# Altium integrated library UCC28C43QDR.IntLib: 1 symbol
Pins are listed as number, name and electrical type; pins without a type are passive.

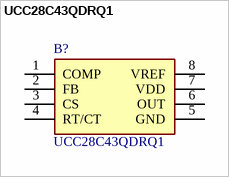
[diagram p0: symbol UCC28C43QDRQ1]

## UCC28C43QDRQ1
designator B?
Automotive BiCMOS Low-Power Current-Mode PWM Controller; Manufacturer_Name: Texas Instruments; Geometry.Height: 1.75mm; Manufacturer_Part_Number: UCC28C43QDRQ1; Mouser Part Number: 595-UCC28C43QDRQ1; Mouser Price/Stock: https://www.mouser.co.uk/ProductDetail/Texas-Instruments/UCC28C43QDRQ1?qs=xhbEVWpZdWdYUtf6Fj0SHg%3D%3D; Arrow Part Number: UCC28C43QDRQ1; Arrow Price/Stock: https://www.arrow.com/en/products/ucc28c43qdrq1/texas-instruments.html?utm_currency=USD&region=nac; Datasheet Link: http://www.ti.com/lit/gpn/ucc28c43-q1
footprint SOIC127P600X175-8N
pins: 1 COMP, 2 FB, 3 CS, 4 RT/CT, 5 GND, 6 OUT, 7 VDD, 8 VREF